# Altium footprint library audio$.PcbLib: 28 footprints (part 2 of 2)
Each footprint in its own frame and in the unit in brackets; x right, y up, seen from the top. Pads: shape width x height; smd on the part's side, far side on the other; paste and mask are expansions set on the pad; w line width, h text height; cw(c..) or ccw(c..) is an arc to the next point about the centre after c.
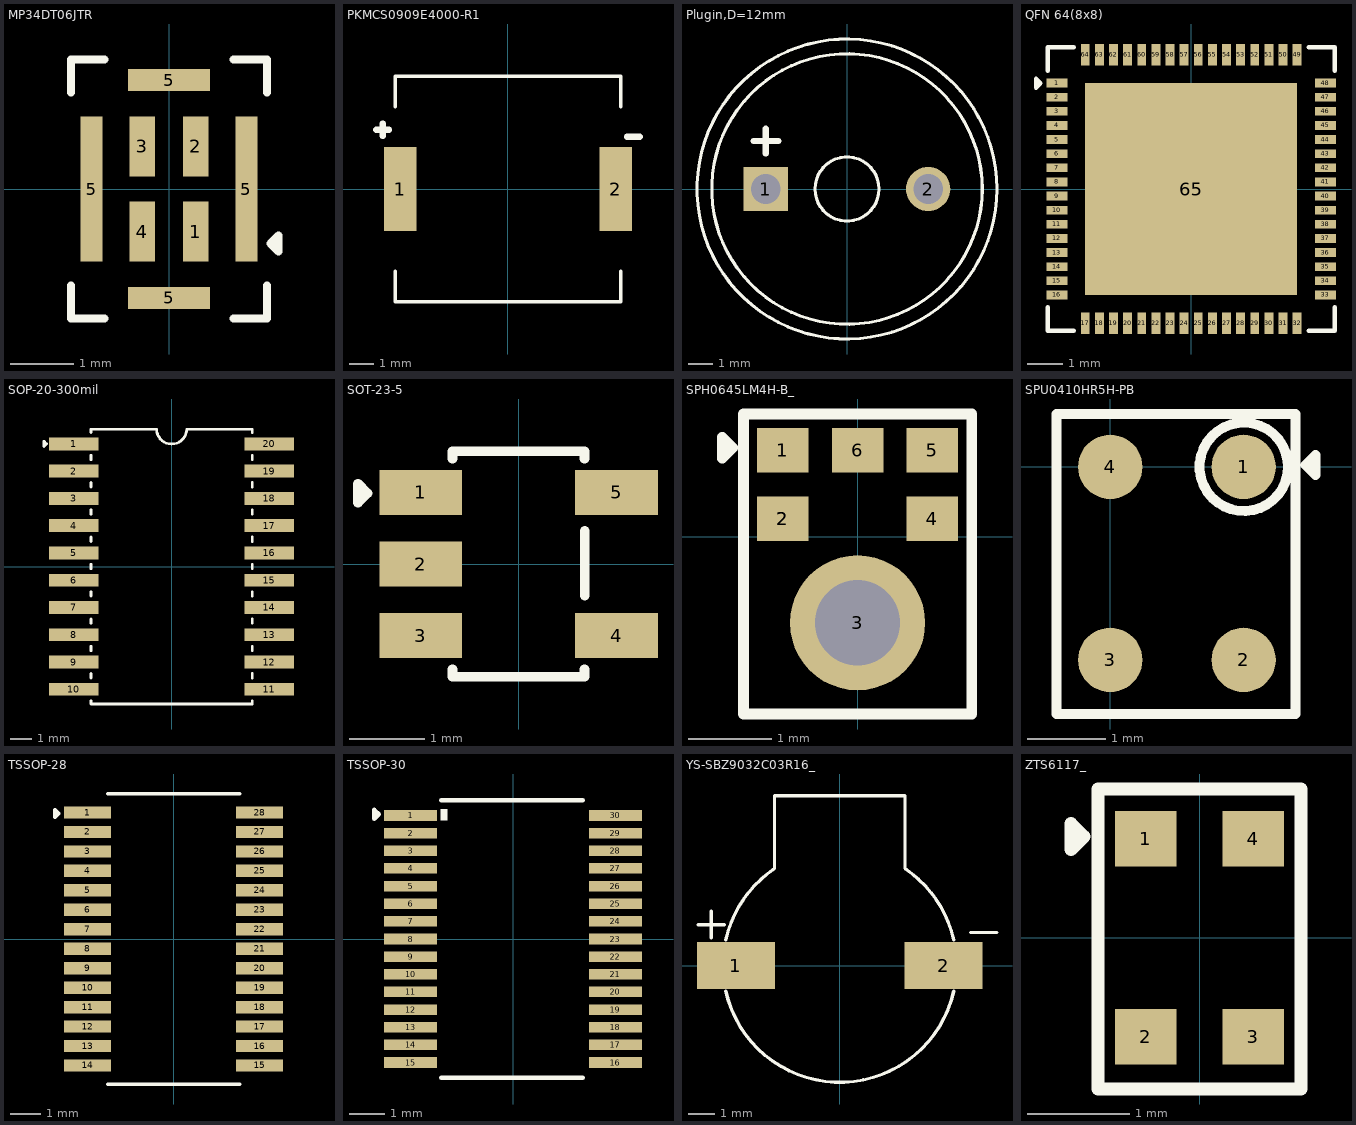
[diagram p1: the footprints below, top view; thin cyan lines are the x and y axes]

## MP34DT06JTR [mm]
pads (8):
  rect 0.4x0.95 smd: 1(0.425,-0.675) 2(0.425,0.675) 3(-0.425,0.675) 4(-0.425,-0.675)
  rect 0.35x2.3 smd: 5(-1.225,0) 5(1.225,0)
  rect 1.3x0.35 smd: 5(0,-1.725) 5(0,1.725)
Top Overlay:
  lines w0.127: -1.55,-1.525 -1.55,-2.05 -1.025,-2.05 ; -1.55,1.525 -1.55,2.05 -1.025,2.05 ; 1.025,-2.05 1.55,-2.05 1.55,-1.525 ; 1.025,2.05 1.55,2.05 1.55,1.525 ; 1.609,-0.862 1.736,-0.735 1.736,-0.989 1.609,-0.862
3D body "IC_STMicroelectronics_MP34DT06JTR_eec.STEP": height 1.1, standoff 0, extent -1.501,-2 1.499,2

## PKMCS0909E4000-R1 [mm]
pads (2):
  rect 1.3x3.4 smd: 1(-4.35,0) 2(4.35,0)
Top Overlay:
  lines w0.127: -4.547,-3.302 -4.547,-4.547 4.547,-4.547 4.547,-3.302 ; -4.547,3.302 -4.547,4.547 4.547,4.547 4.547,3.302
  lines w0.254: -5.309,2.388 -4.801,2.388 ; -5.055,2.134 -5.055,2.642 ; 4.801,2.108 5.309,2.108
3D body "PKMCS0909E4000-R1--3DModel-STEP-56544.STEP": height 1.9, standoff 0, extent -4.5,-4.5 4.5,4.5

## Plugin,D=12mm [mm]
pads (2):
  rect 1.8x1.8 hole 1.2: 1(-3.3,0)
  round 1.8 hole 1.2: 2(3.3,0)
Top Overlay:
  circle w0.127: c0,0 r1.303
  circle w0.127: c0,0 r5.5
  circle w0.127: c0,0 r6.1
  lines w0.254: -3.8,1.948 -2.8,1.948 ; -3.3,1.448 -3.3,2.448
3D body "C2693578.step": height 6.01, standoff -4.5, extent -6,-6 5.988,6

## QFN 64(8x8) [mm]
pads (65):
  rect 0.6x0.25 smd: 1(-3.8,3) 2(-3.8,2.6) 3(-3.8,2.2) 4(-3.8,1.8) 5(-3.8,1.4) 6(-3.8,1) 7(-3.8,0.6) 8(-3.8,0.2) 9(-3.8,-0.2) 10(-3.8,-0.6) 11(-3.8,-1) 12(-3.8,-1.4) 13(-3.8,-1.8) 14(-3.8,-2.2) 15(-3.8,-2.6) 16(-3.8,-3) 33(3.8,-3) 34(3.8,-2.6) 35(3.8,-2.2) 36(3.8,-1.8) 37(3.8,-1.4) 38(3.8,-1) 39(3.8,-0.6) 40(3.8,-0.2) 41(3.8,0.2) 42(3.8,0.6) 43(3.8,1) 44(3.8,1.4) 45(3.8,1.8) 46(3.8,2.2) 47(3.8,2.6) 48(3.8,3)
  rect 0.25x0.6 smd: 17(-3,-3.8) 18(-2.6,-3.8) 19(-2.2,-3.8) 20(-1.8,-3.8) 21(-1.4,-3.8) 22(-1,-3.8) 23(-0.6,-3.8) 24(-0.2,-3.8) 25(0.2,-3.8) 26(0.6,-3.8) 27(1,-3.8) 28(1.4,-3.8) 29(1.8,-3.8) 30(2.2,-3.8) 31(2.6,-3.8) 32(3,-3.8) 49(3,3.8) 50(2.6,3.8) 51(2.2,3.8) 52(1.8,3.8) 53(1.4,3.8) 54(1,3.8) 55(0.6,3.8) 56(0.2,3.8) 57(-0.2,3.8) 58(-0.6,3.8) 59(-1,3.8) 60(-1.4,3.8) 61(-1.8,3.8) 62(-2.2,3.8) 63(-2.6,3.8) 64(-3,3.8)
  rect 6x6 smd: 65(0,0)
Top Overlay:
  lines w0.127: -4.064,-3.353 -4.064,-4.013 -3.327,-4.013 ; -4.064,3.353 -4.064,4.013 -3.327,4.013 ; 3.327,-4.013 4.064,-4.013 4.064,-3.353 ; 3.327,4.013 4.064,4.013 4.064,3.353 ; -4.394,2.87 -4.394,3.124 -4.267,2.997 -4.394,2.87
3D body "User Library-QFN64_8x8.step": height 0.81, standoff 0, extent -4,-4.013 4,3.987

## SOP-20-300mil [mm]
pads (20):
  rect 2.3x0.6 smd paste+0 mask+0.051: 1(-4.55,5.715) 2(-4.55,4.445) 3(-4.55,3.175) 4(-4.55,1.905) 5(-4.55,0.635) 6(-4.55,-0.635) 7(-4.55,-1.905) 8(-4.55,-3.175) 9(-4.55,-4.445) 10(-4.55,-5.715) 11(4.55,-5.715) 12(4.55,-4.445) 13(4.55,-3.175) 14(4.55,-1.905) 15(4.55,-0.635) 16(4.55,0.635) 17(4.55,1.905) 18(4.55,3.175) 19(4.55,4.445) 20(4.55,5.715)
Top Overlay:
  lines w0.127: -3.75,-6.246 -3.75,-6.4 3.75,-6.4 3.75,-6.246 ; -3.75,-5.184 -3.75,-4.976 ; -3.75,-3.914 -3.75,-3.706 ; -3.75,-2.644 -3.75,-2.436 ; -3.75,-1.374 -3.75,-1.166 ; -3.75,-0.104 -3.75,0.104 ; -3.75,1.166 -3.75,1.374 ; -3.75,2.436 -3.75,2.644 ; -3.75,3.706 -3.75,3.914 ; -3.75,4.976 -3.75,5.184 ; -3.75,6.246 -3.75,6.4 -0.7,6.4 ; -0.701,6.401 ccw(c-0.001,6.405) 0.7,6.4 3.75,6.4 3.75,6.246 ; 3.75,-5.184 3.75,-4.976 ; 3.75,-3.914 3.75,-3.706 ; 3.75,-2.644 3.75,-2.436 ; 3.75,-1.374 3.75,-1.166 ; 3.75,-0.104 3.75,0.104 ; 3.75,1.166 3.75,1.374 ; 3.75,2.436 3.75,2.644 ; 3.75,3.706 3.75,3.914 ; 3.75,4.976 3.75,5.184 ; -5.944,5.588 -5.817,5.715 -5.944,5.842 -5.944,5.588

## SOT-23-5 [mm]
pads (5):
  rect 1.1x0.6 smd: 1(-1.3,0.95) 2(-1.3,0) 3(-1.3,-0.95) 4(1.3,-0.95) 5(1.3,0.95)
Top Overlay:
  lines w0.127: -0.879,-1.399 -0.879,-1.499 0.874,-1.499 0.874,-1.399 ; -0.879,1.399 -0.879,1.499 0.874,1.499 0.874,1.399 ; 0.88,-0.418 0.88,0.44 ; -2.134,0.813 -2.007,0.94 -2.134,1.067 -2.134,0.813
3D body "SN74LV1T34DBVR.STEP": height 1.45, standoff 0, extent -1.4,-1.45 1.4,1.45

## SPH0645LM4H-B_ [mm] "MEMS Microphones DIG MEMs Mic, BP w/ I2S output"
pads (7):
  rect 0.62x0.532 smd: 1(-0.9,1.037) 2(-0.9,0.215) 2(-0.9,0.215) 4(0.9,0.215) 5(0.9,1.037) 6(0,1.037)
  round 1.624 / inner round 1.624 / far side round 0 hole 1.024 unplated: 3(0,-1.037)
Top Overlay:
  lines w0.127: -1.626,0.94 -1.499,1.067 -1.626,1.194 -1.626,0.94 ; -1.372,-2.134 -1.372,1.473 1.372,1.473 1.372,-2.134 -1.372,-2.134
3D body "SPH0645LM4H-B--3DModel-STEP-56544.STEP": height 1.07, standoff -0.01, extent -1.325,-2.08 1.325,1.42

## SPU0410HR5H-PB [mm]
pads (4):
  round 0.82 smd: 1(1.7,0) 2(1.7,-2.46) 3(0,-2.46) 4(0,0)
Top Overlay:
  circle w0.127: c1.702,0 r0.564
  lines w0.127: -0.686,-3.15 -0.686,0.674 2.362,0.674 2.362,-3.15 -0.686,-3.15 ; 2.489,0.025 2.616,-0.102 2.616,0.152 2.489,0.025
3D body "spu0410hr5h-pb.stp": height 1.03, standoff -0.07, extent -0.624,-3.112 2.326,0.648

## TSSOP-28 [mm]
pads (28):
  rect 1.57x0.41 smd: 1(-2.87,4.225) 2(-2.87,3.575) 3(-2.87,2.925) 4(-2.87,2.275) 5(-2.87,1.625) 6(-2.87,0.975) 7(-2.87,0.325) 8(-2.87,-0.325) 9(-2.87,-0.975) 10(-2.87,-1.625) 11(-2.87,-2.275) 12(-2.87,-2.925) 13(-2.87,-3.575) 14(-2.87,-4.225) 15(2.87,-4.225) 16(2.87,-3.575) 17(2.87,-2.925) 18(2.87,-2.275) 19(2.87,-1.625) 20(2.87,-0.975) 21(2.87,-0.325) 22(2.87,0.325) 23(2.87,0.975) 24(2.87,1.625) 25(2.87,2.275) 26(2.87,2.925) 27(2.87,3.575) 28(2.87,4.225)
Top Overlay:
  lines w0.127: -2.2,-4.85 2.2,-4.85 ; -2.2,4.85 2.2,4.85 ; -3.962,4.064 -3.835,4.191 -3.962,4.318 -3.962,4.064
3D body "DIR9001PWR.step": height 1.2, standoff 0, extent -3.2,-4.85 3.2,4.85

## TSSOP-30 [mm]
pads (30):
  rect 1.5x0.3 smd: 1(-2.9,3.5) 2(-2.9,3) 3(-2.9,2.5) 4(-2.9,2) 5(-2.9,1.5) 6(-2.9,1) 7(-2.9,0.5) 8(-2.9,0) 9(-2.9,-0.5) 10(-2.9,-1) 11(-2.9,-1.5) 12(-2.9,-2) 13(-2.9,-2.5) 14(-2.9,-3) 15(-2.9,-3.5) 16(2.9,-3.5) 17(2.9,-3) 18(2.9,-2.5) 19(2.9,-2) 20(2.9,-1.5) 21(2.9,-1) 22(2.9,-0.5) 23(2.9,0) 24(2.9,0.5) 25(2.9,1) 26(2.9,1.5) 27(2.9,2) 28(2.9,2.5) 29(2.9,3) 30(2.9,3.5)
Top Overlay:
  rectangle: -2.057,3.353 -1.854,3.683
  lines w0.127: -2.032,-3.937 1.981,-3.937 ; -2.032,3.937 1.981,3.937 ; -3.937,3.404 -3.937,3.658 -3.81,3.531 -3.937,3.404
3D body "DBT0030A.stp": height 1.13, standoff 0, extent -3.2,-3.9 3.2,3.9

## YS-SBZ9032C03R16_ [mm] "NO 2700Hz 85dB @ 3V, 10cm 3V F9mm SMD,9x3.2mm Buzzers RoHS"
pads (2):
  rect 3x1.8 smd: 1(-4,0) 2(4,0)
Top Overlay:
  lines w0.127: -5.461,1.575 -4.445,1.575 ; -4.953,1.075 -4.953,2.091 ; -4.391,-0.984 ccw(c0,0) 4.389,-0.992 ; -4.391,0.984 cw(c0,0) -2.51,3.735 -2.51,6.543 2.51,6.543 2.51,3.735 cw(c0,0) 4.391,0.984 ; 5.042,1.27 6.058,1.27
3D body "YS-SBZ9032C03R16.STEP": height 3.3, standoff 0, extent -5.25,-4.5 5.25,6.5

## ZTS6117_ [mm]
pads (4):
  rect 0.6x0.54 smd: 1(-0.525,0.965) 2(-0.525,-0.965) 3(0.525,-0.965) 4(0.525,0.965)
Top Overlay:
  lines w0.127: -0.991,1.422 -0.991,-1.472 0.991,-1.472 ; -0.991,1.449 0.989,1.449 0.991,1.448 0.991,-1.473 ; -1.254,0.859 -1.254,1.113 -1.127,0.986 -1.254,0.859
3D body "ZTS6117.STEP": height 0.9, standoff -0.01, extent -0.921,-1.375 0.929,1.375